# Altium integrated library VIETTIEN.IntLib: 173 symbols (part 3 of 8)

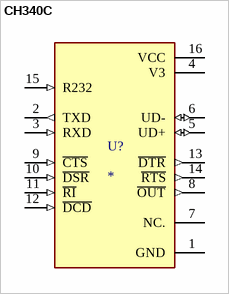
[diagram p46: symbol CH340C]

## CH340C
designator U?
USB to serial chip CH340; MP: CH340C; MF: WCH; Price: None; Availability: Not in stock; Package: None; SnapEDA_Link: https://www.snapeda.com/parts/CH340C/WCH/view-part/?ref=snap; Check_prices: https://www.snapeda.com/parts/CH340C/WCH/view-part/?ref=eda; Value: *
footprint CH340C
pins: 1 GND (power), 2 TXD (out), 3 RXD (in), 4 V3 (power), 5 UD+ (io), 6 UD- (io), 7 NC., 8 ~{OUT} (out), 9 ~{CTS} (in), 10 ~{DSR} (in), 11 ~{RI} (in), 12 ~{DCD} (in), 13 ~{DTR} (out), 14 ~{RTS} (out), 15 R232 (in), 16 VCC (power)


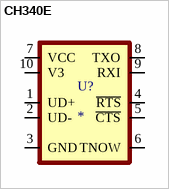
[diagram p47: symbol CH340E]

## CH340E
designator U?
USB to serial chip CH340; MF: WCH; MP: CH340E; SnapEDA_Link: https://www.snapeda.com/parts/CH340E/WCH/view-part/?ref=snap; Package: Package; Value: *; Check_prices: https://www.snapeda.com/parts/CH340E/WCH/view-part/?ref=eda
footprint CH340E
pins: 1 UD+ (io), 2 UD- (io), 3 GND (io), 4 ~{RTS} (io), 5 ~{CTS} (io), 6 TNOW (io), 7 VCC (io), 8 TXO (io), 9 RXI (io), 10 V3 (io)


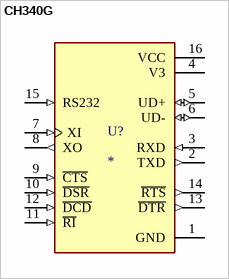
[diagram p48: symbol CH340G]

## CH340G
designator U?
USB Interface Integrated Circuit; MP: Ch340G; MF: WCH; Value: *; SnapEDA_Link: https://www.snapeda.com/parts/Ch340G/WCH/view-part/?ref=snap; Check_prices: https://www.snapeda.com/parts/Ch340G/WCH/view-part/?ref=eda; Availability: Not in stock; Price: None; Package: None
footprint CH340G
pins: 1 GND (power), 2 TXD (out), 3 RXD (in), 4 V3 (power), 5 UD+ (io), 6 UD- (io), 7 XI (in), 8 XO (out), 9 ~{CTS} (in), 10 ~{DSR} (in), 11 ~{RI} (in), 12 ~{DCD} (in), 13 ~{DTR} (out), 14 ~{RTS} (out), 15 RS232 (in), 16 VCC (power)


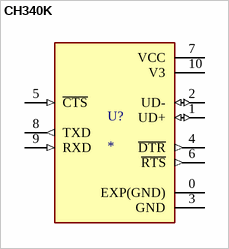
[diagram p49: symbol CH340K]

## CH340K
designator U?
USB to Serial Port Chip; MF: WCH; MP: CH340K; SnapEDA_Link: https://www.snapeda.com/parts/CH340K/WCH/view-part/?ref=snap; Package: Package; Value: *; Check_prices: https://www.snapeda.com/parts/CH340K/WCH/view-part/?ref=eda
footprint CH340K
pins: 0 EXP(GND) (power), 1 UD+ (io), 2 UD- (io), 3 GND (power), 4 ~{DTR} (out), 5 ~{CTS} (in), 6 ~{RTS} (out), 7 VCC (power), 8 TXD (out), 9 RXD (in), 10 V3 (power)


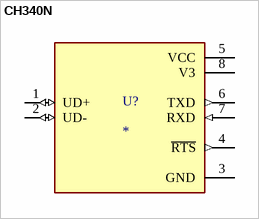
[diagram p50: symbol CH340N]

## CH340N
designator U?
USB to Serial Port Chip; MF: WCH; MP: CH340N; SnapEDA_Link: https://www.snapeda.com/parts/CH340N/WCH/view-part/?ref=snap; Package: Package; Value: *; Check_prices: https://www.snapeda.com/parts/CH340N/WCH/view-part/?ref=eda
footprint CH340N
pins: 1 UD+ (io), 2 UD- (io), 3 GND (power), 4 ~{RTS} (out), 5 VCC (power), 6 TXD (out), 7 RXD (in), 8 V3 (power)


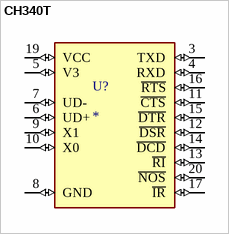
[diagram p51: symbol CH340T]

## CH340T
designator U?
Interface Development Tools USB - Serial Convert with CH340T; MF: wch; SnapEDA_Link: https://www.snapeda.com/parts/CH340T/WCH/view-part/?ref=snap; Package: None; Value: *; MP: CH340T; Check_prices: https://www.snapeda.com/parts/CH340T/WCH/view-part/?ref=eda
footprint CH340T
pins: 3 TXD (io), 4 RXD (io), 5 V3 (io), 6 UD+ (io), 7 UD- (io), 8 GND (io), 9 X1 (io), 10 X0 (io), 11 ~{CTS} (io), 12 ~{DSR} (io), 13 ~{RI} (io), 14 ~{DCD} (io), 15 ~{DTR} (io), 16 ~{RTS} (io), 17 ~{IR} (io), 19 VCC (io), 20 ~{NOS} (io)


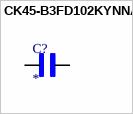
[diagram p52: symbol CK45-B3FD102KYNNA]

## CK45-B3FD102KYNNA
designator C?
1000 pF Â±10% 3000V (3kV) Ceramic Capacitor B Radial, Disc; MF: TDK; MP: CK45-B3FD102KYNNA; SnapEDA_Link: https://www.snapeda.com/parts/CK45-B3FD102KYNNA/TDK/view-part/?ref=snap; Package: None; Value: *; Check_prices: https://www.snapeda.com/parts/CK45-B3FD102KYNNA/TDK/view-part/?ref=eda
footprint CAPRB750W60L900T600H1300
pins: 1, 2


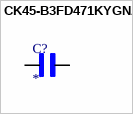
[diagram p53: symbol CK45-B3FD471KYGNA]

## CK45-B3FD471KYGNA
designator C?
MF: {'manufacturer': u'TDK'}; MP: CK45-B3FD471KYGNA; Package: None; Price: None; Value: *; Availability: Unavailable
footprint CAPRB750W60L700T600H1100
pins: 1, 2


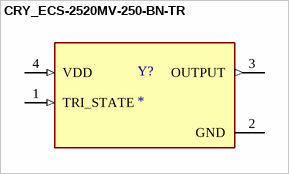
[diagram p54: symbol CRY_ECS-2520MV-250-BN-TR]

## CRY_ECS-2520MV-250-BN-TR
designator Y?
25 MHz XO (Standard) HCMOS Oscillator 1.6V ~ 3.6V Enable/Disable 4-SMD, No Lead; MF: ECS Inc.; MP: ECS-2520MV-250-BN-TR; SnapEDA_Link: https://www.snapeda.com/parts/ECS-2520MV-250-BN-TR/ECS/view-part/?ref=snap; Package: ECS-2520MV-0-4 ECS; Value: *; Check_prices: https://www.snapeda.com/parts/ECS-2520MV-250-BN-TR/ECS/view-part/?ref=eda
footprint OSC_ECS-2520S25-250-FN-TR
pins: 1 TRI_STATE (in), 2 GND (power), 3 OUTPUT (out), 4 VDD (in)


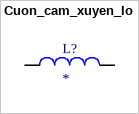
[diagram p55: symbol Cuon_cam_xuyen_lo]

## Cuon_cam_xuyen_lo
designator L?
Inductor 50125-33uH 8A; MF: {'manufacturer': u'W\xfcrth Elektronik'}; MP: 7447076; Package: None; Price: None; Value: *; Availability: Unavailable
footprint WE-FI_7447076
pins: 1, 2


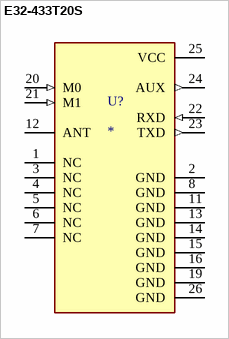
[diagram p56: symbol E32-433T20S]

## E32-433T20S
designator U?
Wireless serial port module (UART); MP: E32-433T20S; MF: EBYTE; Check_prices: https://www.snapeda.com/parts/E32-433T20S/EBYTE/view-part/?ref=eda; Package: Package; Value: *; SnapEDA_Link: https://www.snapeda.com/parts/E32-433T20S/EBYTE/view-part/?ref=snap; Price: None; Availability: Not in stock
footprint MODULE_E32-433T20S
pins: 1 NC, 2 GND (power), 3 NC, 4 NC, 5 NC, 6 NC, 7 NC, 8 GND (power), 11 GND (power), 12 ANT, 13 GND (power), 14 GND (power), 15 GND (power), 16 GND (power), 19 GND (power), 20 M0 (in), 21 M1 (in), 22 RXD (in), 23 TXD (out), 24 AUX (out), 25 VCC (power), 26 GND (power)


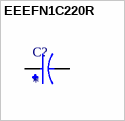
[diagram p57: symbol EEEFN1C220R]

## EEEFN1C220R
designator C?
CAP ALUM 22UF 20% 16V SMD; MF: Panasonic Electronic Components; MP: EEE-FN1C220R; Package: RADIAL-2 Panasonic; Value: *; Price: None; Check_prices: https://www.snapeda.com/parts/EEE-FN1C220R/Panasonic/view-part/6178704/?ref=eda; Purchase-URL: https://pricing.snapeda.com/search/part/EEE-FN1C220R/?ref=eda; Availability: In Stock; SnapEDA_Link: https://www.snapeda.com/parts/EEE-FN1C220R/Panasonic/view-part/6178704/?ref=snap
footprint CAP_EEEFN1C220R
pins: 1, 2


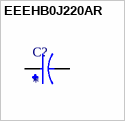
[diagram p58: symbol EEEHB0J220AR]

## EEEHB0J220AR
designator C?
CAP ALUM 22UF 20% 6.3V SMD; MF: Panasonic; MP: EEE-HB0J220AR; Availability: In Stock; Value: *; Check_prices: https://www.snapeda.com/parts/EEE-HB0J220AR/Panasonic/view-part/2368491/?ref=eda; Package: RADIAL-2 Panasonic; SnapEDA_Link: https://www.snapeda.com/parts/EEE-HB0J220AR/Panasonic/view-part/2368491/?ref=snap; Price: None; Purchase-URL: https://pricing.snapeda.com/search/part/EEE-HB0J220AR/?ref=eda
footprint CAP_EEEHB0J220AR
pins: 1, 2


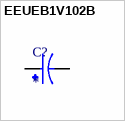
[diagram p59: symbol EEUEB1V102B]

## EEUEB1V102B
designator C?
Cap Aluminum 1000uF 35V 20% (12.5 X 25mm) Radial 5mm 586mA 10000 hr 105C Ammo Pack; MP: EEU-EB1V102B; MF: Panasonic; Check_prices: https://www.snapeda.com/parts/EEU-EB1V102B/Panasonic/view-part/?ref=eda; Package: RADIAL-2 Panasonic; SnapEDA_Link: https://www.snapeda.com/parts/EEU-EB1V102B/Panasonic/view-part/?ref=snap; Value: *; Purchase-URL: https://pricing.snapeda.com/search/part/EEU-EB1V102B/?ref=eda; Price: None; Availability: In Stock
footprint CAPPRD500W60D1250H2500
pins: N, P


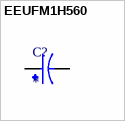
[diagram p60: symbol EEUFM1H560]

## EEUFM1H560
designator C?
Cap Aluminum Lytic 56uF 50V 20% (6 X 11.2mm) Radial 2.5mm 405mA 2000h 105C Bulk; MP: EEU-FM1H560; MF: Panasonic; Availability: In Stock; Purchase-URL: https://pricing.snapeda.com/search/part/EEU-FM1H560/?ref=eda; Package: RADIAL-2 Panasonic; Value: *; Check_prices: https://www.snapeda.com/parts/EEU-FM1H560/Panasonic/view-part/?ref=eda; SnapEDA_Link: https://www.snapeda.com/parts/EEU-FM1H560/Panasonic/view-part/?ref=snap; Price: None
footprint CAPPRD250W50D630H1120
pins: N, P


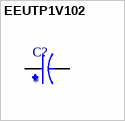
[diagram p61: symbol EEUTP1V102]

## EEUTP1V102
designator C?
1000ÂµF 35V Aluminum Electrolytic Capacitors Radial, Can 5000 Hrs @ 125Â°C; MF: Panasonic; MP: EEUTP1V102; SnapEDA_Link: https://www.snapeda.com/parts/EEUTP1V102/Panasonic/view-part/5792291/?ref=snap; Price: None; Check_prices: https://www.snapeda.com/parts/EEUTP1V102/Panasonic/view-part/5792291/?ref=eda; Package: RADIAL-2 Panasonic; Availability: In Stock; Value: *
footprint CAPPRD750W80D1600H2000
pins: N, P


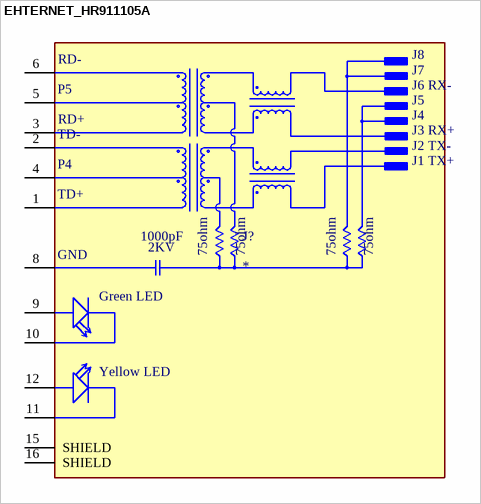
[diagram p62: symbol EHTERNET_HR911105A]

## EHTERNET_HR911105A
designator J?
DIP RJ45 Connector;; MP: HR911105A; MF: hanrun; SnapEDA_Link: https://www.snapeda.com/parts/HR911105A/HanRun/view-part/?ref=snap; Package: None; Check_prices: https://www.snapeda.com/parts/HR911105A/HanRun/view-part/?ref=eda; Price: None; Value: *; Availability: Not in stock
footprint HANRUN_HR911105A
pins: 1 TD+, 2 TD-, 3 RD+, 4 P4, 5 P5, 6 RD-, 8 GND (power), 9 GA, 10 GC, 11 YC, 12 YA, 15 SHIELD, 16 SHIELD
text: J8; J7; J6 RX-; J5; J4; J3 RX+; J2 TX-; J1 TX+; 1000pF; 2KV; 75ohm; Green LED; Yellow LED


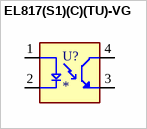
[diagram p63: symbol EL817(S1)(C)(TU)-VG]

## EL817(S1)(C)(TU)-VG
designator U?
Optoisolator Transistor Output 5000Vrms 1 Channel 4-SMD; MF: Everlight Electronics; MP: EL817(S1)(A)(TU)-VG; SnapEDA_Link: https://www.snapeda.com/parts/EL817(S1)(A)(TU)-VG/Everlight/view-part/?ref=snap; Package: NON STANDARD-4 Everlight; Value: *; Check_prices: https://www.snapeda.com/parts/EL817(S1)(A)(TU)-VG/Everlight/view-part/?ref=eda
footprint SOIC254P1030X390-4N_EL817(S1)(C)(TU)-VG
pins: 1 A, 2 C, 3 ET, 4 CT


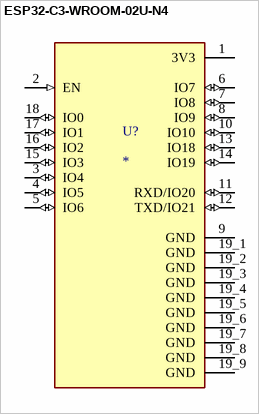
[diagram p64: symbol ESP32-C3-WROOM-02U-N4]

## ESP32-C3-WROOM-02U-N4
designator U?
Bluetooth, WiFi 802.11b/g/n, Bluetooth v5.0 Transceiver Module 2.4GHz Antenna Not Included, U.FL Surface Mount; MF: Espressif Systems; MP: ESP32-C3-WROOM-02U-N4; SnapEDA_Link: https://www.snapeda.com/parts/ESP32-C3-WROOM-02U-N4/Espressif+Systems/view-part/?ref=snap; Package: SMD-19 Espressif Systems; Value: *; Check_prices: https://www.snapeda.com/parts/ESP32-C3-WROOM-02U-N4/Espressif+Systems/view-part/?ref=eda
footprint XCVR_ESP32-C3-WROOM-02U-N4
pins: 1 3V3 (power), 2 EN (in), 3 IO4 (io), 4 IO5 (io), 5 IO6 (io), 6 IO7 (io), 7 IO8 (io), 8 IO9 (io), 9 GND (power), 10 IO10 (io), 11 RXD/IO20 (io), 12 TXD/IO21 (io), 13 IO18 (io), 14 IO19 (io), 15 IO3 (io), 16 IO2 (io), 17 IO1 (io), 18 IO0 (io), 19_1 GND (power), 19_2 GND (power), 19_3 GND (power), 19_4 GND (power), 19_5 GND (power), 19_6 GND (power), 19_7 GND (power), 19_8 GND (power), 19_9 GND (power)


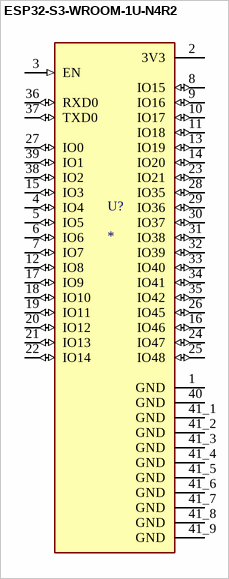
[diagram p65: symbol ESP32-S3-WROOM-1U-N4R2]

## ESP32-S3-WROOM-1U-N4R2
designator U?
MF: {'manufacturer': u'Espressif Systems'}; MP: ESP32-S3-WROOM-1U-N4R2; Package: None; Price: None; Value: *; Availability: Unavailable
footprint XCVR_ESP32-S3-WROOM-1U-N4R2
pins: 1 GND (power), 2 3V3 (power), 3 EN (in), 4 IO4 (io), 5 IO5 (io), 6 IO6 (io), 7 IO7 (io), 8 IO15 (io), 9 IO16 (io), 10 IO17 (io), 11 IO18 (io), 12 IO8 (io), 13 IO19 (io), 14 IO20 (io), 15 IO3 (io), 16 IO46 (io), 17 IO9 (io), 18 IO10 (io), 19 IO11 (io), 20 IO12 (io), 21 IO13 (io), 22 IO14 (io), 23 IO21 (io), 24 IO47 (io), 25 IO48 (io), 26 IO45 (io), 27 IO0 (io), 28 IO35 (io), 29 IO36 (io), 30 IO37 (io), 31 IO38 (io), 32 IO39 (io), 33 IO40 (io), 34 IO41 (io), 35 IO42 (io), 36 RXD0 (io), 37 TXD0 (io), 38 IO2 (io), 39 IO1 (io), 40 GND (power), 41_1 GND (power), 41_2 GND (power), 41_3 GND (power), 41_4 GND (power), 41_5 GND (power), 41_6 GND (power), 41_7 GND (power), 41_8 GND (power), 41_9 GND (power)


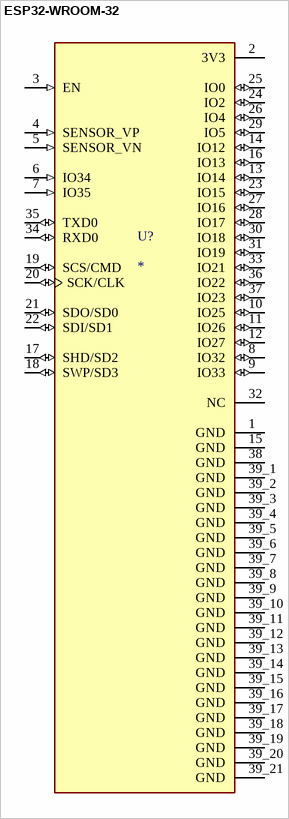
[diagram p66: symbol ESP32-WROOM-32]

## ESP32-WROOM-32
designator U?
Bluetooth, WiFi 802.11b/g/n, Bluetooth v4.2 +EDR, Class 1, 2 and 3 Transceiver Module 2.4GHz ~ 2.5GHz Antenna Not Included, U.FL Surface Mount; MP: ESP32-WROOM-32; MF: Espressif Systems; Price: None; Availability: In Stock; Package: Module Espressif Systems; SnapEDA_Link: https://www.snapeda.com/parts/ESP32-WROOM-32/Espressif+Systems/view-part/?ref=snap; Check_prices: https://www.snapeda.com/parts/ESP32-WROOM-32/Espressif+Systems/view-part/?ref=eda; Value: *; Purchase-URL: https://pricing.snapeda.com/search/part/ESP32-WROOM-32/?ref=eda
footprint MODULE_ESP32-WROOM-32
pins: 1 GND (power), 2 3V3 (power), 3 EN (in), 4 SENSOR_VP (in), 5 SENSOR_VN (in), 6 IO34 (in), 7 IO35 (in), 8 IO32 (io), 9 IO33 (io), 10 IO25 (io), 11 IO26 (io), 12 IO27 (io), 13 IO14 (io), 14 IO12 (io), 15 GND (power), 16 IO13 (io), 17 SHD/SD2 (io), 18 SWP/SD3 (io), 19 SCS/CMD (io), 20 SCK/CLK (io), 21 SDO/SD0 (io), 22 SDI/SD1 (io), 23 IO15 (io), 24 IO2 (io), 25 IO0 (io), 26 IO4 (io), 27 IO16 (io), 28 IO17 (io), 29 IO5 (io), 30 IO18 (io), 31 IO19 (io), 32 NC, 33 IO21 (io), 34 RXD0 (io), 35 TXD0 (io), 36 IO22 (io), 37 IO23 (io), 38 GND (power), 39_1 GND (power), 39_2 GND (power), 39_3 GND (power), 39_4 GND (power), 39_5 GND (power), 39_6 GND (power), 39_7 GND (power), 39_8 GND (power), 39_9 GND (power), 39_10 GND (power), 39_11 GND (power), 39_12 GND (power), 39_13 GND (power), 39_14 GND (power), 39_15 GND (power), 39_16 GND (power), 39_17 GND (power), 39_18 GND (power), 39_19 GND (power), 39_20 GND (power), 39_21 GND (power)


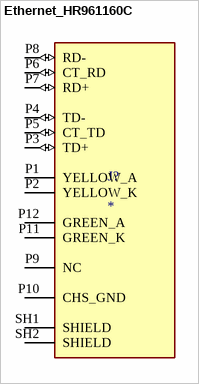
[diagram p67: symbol Ethernet_HR961160C]

## Ethernet_HR961160C
designator J?
1x1 Port Tab-UP Surface Mount RJ45 Connector with Magnetics Module and LEDfor 10/100Base-TX NIC Applications.; MF: HanRun; MP: HR961160C; SnapEDA_Link: https://www.snapeda.com/parts/HR961160C/HanRun/view-part/?ref=snap; Package: Package; Value: *; Check_prices: https://www.snapeda.com/parts/HR961160C/HanRun/view-part/?ref=eda
footprint HANRUN_HR961160C
pins: P1 YELLOW_A, P2 YELLOW_K, P3 TD+ (io), P4 TD- (io), P5 CT_TD (io), P6 CT_RD (io), P7 RD+ (io), P8 RD- (io), P9 NC, P10 CHS_GND (power), P11 GREEN_K, P12 GREEN_A, SH1 SHIELD, SH2 SHIELD


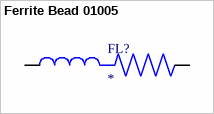
[diagram p68: symbol Ferrite Bead 01005]

## Ferrite Bead 01005
designator FL?
Ferrite Bead 01005; MP: BLF02JD361GNED; MF: Murata; Purchase-URL: https://pricing.snapeda.com/search/part/BLF02JD361GNED/?ref=eda; Package: 0402 Murata; SnapEDA_Link: https://www.snapeda.com/parts/BLF02JD361GNED/Murata/view-part/4302576/?ref=snap; Value: *; Availability: Good; Price: None; Check_prices: https://www.snapeda.com/parts/BLF02JD361GNED/Murata/view-part/4302576/?ref=eda
footprint BEADC0402X32N
pins: 1, 2
